# Altium footprint library Footprint-Lib-PhilsLab.PcbLib: 544 footprints (part 21 of 34)
Each footprint in its own frame and in the unit in brackets; x right, y up, seen from the top. Pads: shape width x height; smd on the part's side, far side on the other; paste and mask are expansions set on the pad; w line width, h text height; cw(c..) or ccw(c..) is an arc to the next point about the centre after c.
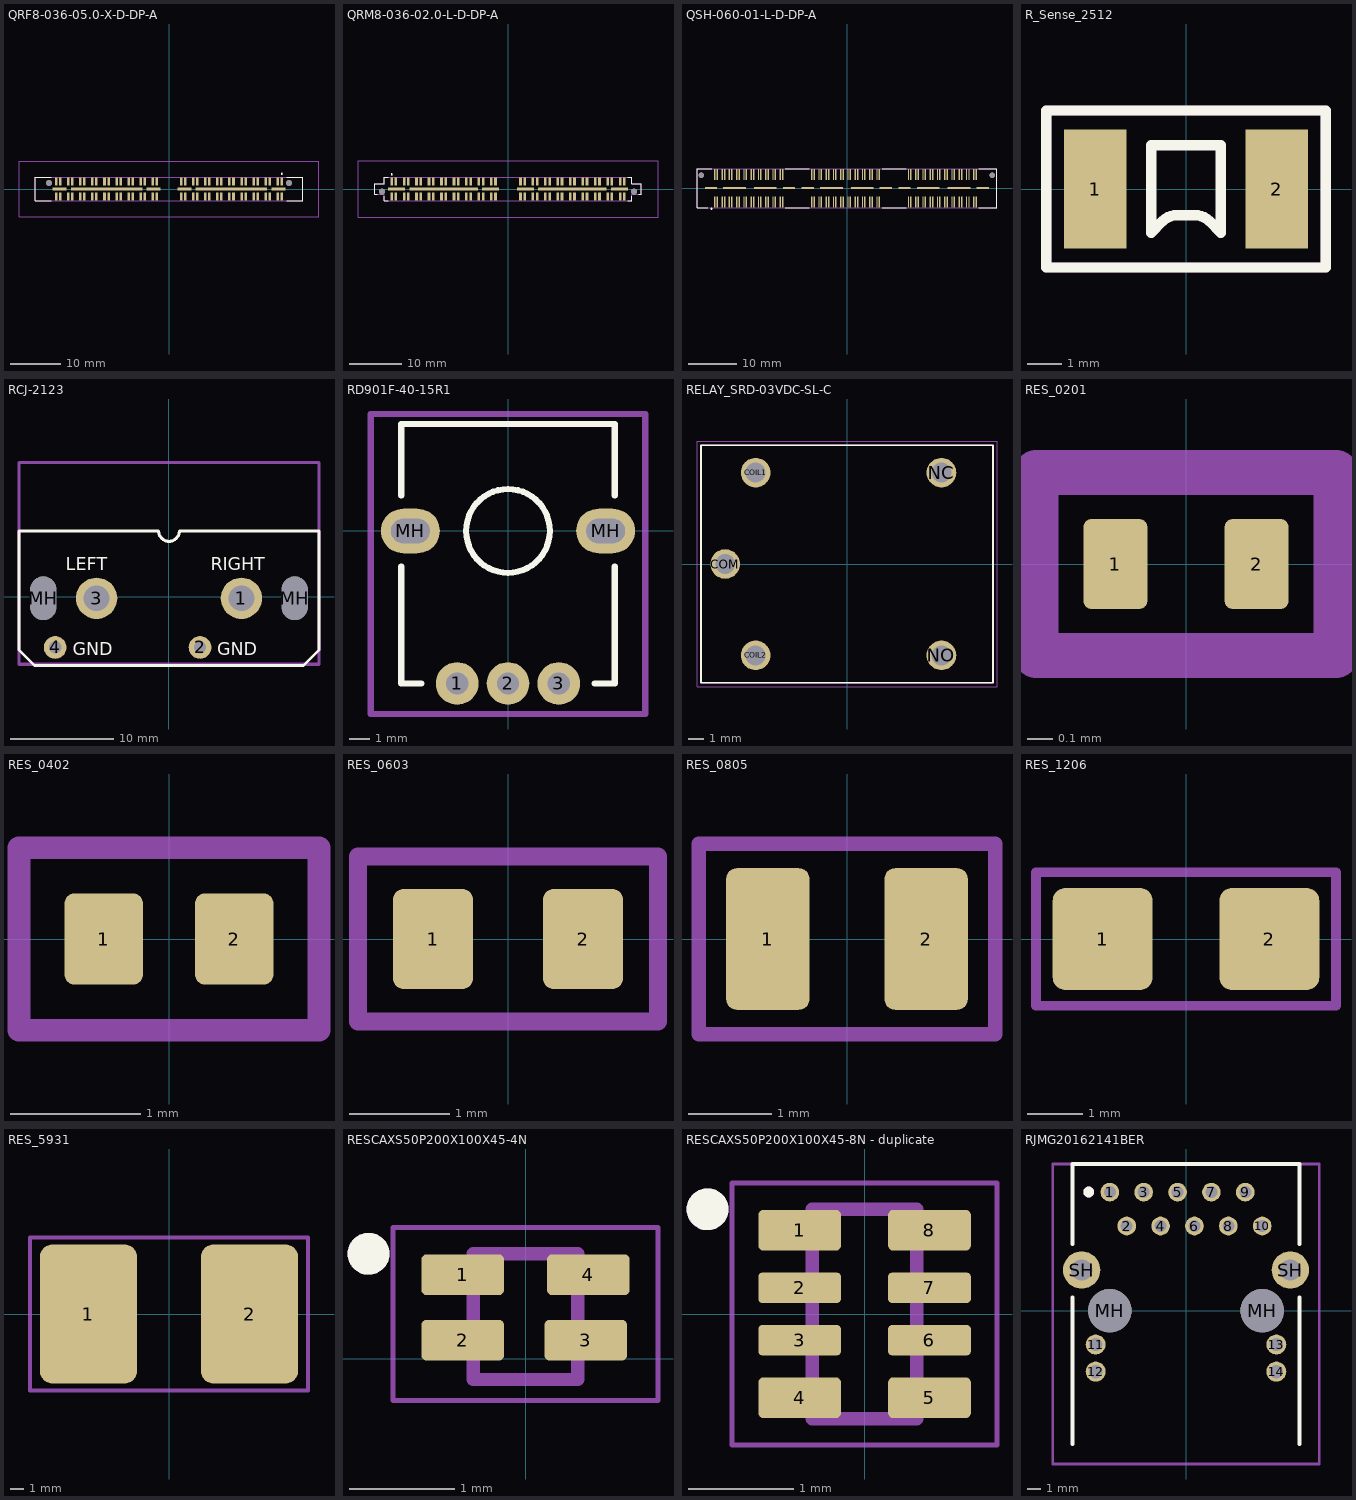
[diagram p20: the footprints below, top view; thin cyan lines are the x and y axes]

## QRF8-036-05.0-X-D-DP-A [mm]
pads (80):
  rect 0.5x1.65 smd: 1(22.4,1.475) 2(22.4,-1.475) 3(21.6,1.475) 4(21.6,-1.475) 5(20,1.475) 6(20,-1.475) 7(19.2,1.475) 8(19.2,-1.475) 9(17.6,1.475) 10(17.6,-1.475) 11(16.8,1.475) 12(16.8,-1.475) 13(15.2,1.475) 14(15.2,-1.475) 15(14.4,1.475) 16(14.4,-1.475) 17(12.8,1.475) 18(12.8,-1.475) 19(12,1.475) 20(12,-1.475) 21(10.4,1.475) 22(10.4,-1.475) 23(9.6,1.475) 24(9.6,-1.475) 25(8,1.475) 26(8,-1.475) 27(7.2,1.475) 28(7.2,-1.475) 29(5.6,1.475) 30(5.6,-1.475) 31(4.8,1.475) 32(4.8,-1.475) 33(3.2,1.475) 34(3.2,-1.475) 35(2.4,1.475) 36(2.4,-1.475) 37(-2.4,1.475) 38(-2.4,-1.475) 39(-3.2,1.475) 40(-3.2,-1.475) 41(-4.8,1.475) 42(-4.8,-1.475) 43(-5.6,1.475) 44(-5.6,-1.475) 45(-7.2,1.475) 46(-7.2,-1.475) 47(-8,1.475) 48(-8,-1.475) 49(-9.6,1.475) 50(-9.6,-1.475) 51(-10.4,1.475) 52(-10.4,-1.475) 53(-12,1.475) 54(-12,-1.475) 55(-12.8,1.475) 56(-12.8,-1.475) 57(-14.4,1.475) 58(-14.4,-1.475) 59(-15.2,1.475) 60(-15.2,-1.475) 61(-16.8,1.475) 62(-16.8,-1.475) 63(-17.6,1.475) 64(-17.6,-1.475) 65(-19.2,1.475) 66(-19.2,-1.475) 67(-20,1.475) 68(-20,-1.475) 69(-21.6,1.475) 70(-21.6,-1.475) 71(-22.4,1.475) 72(-22.4,-1.475)
  rect 2.76x0.56 smd: 73(-21.72,0) 73(-3.08,0) 73(3.08,0) 73(21.72,0)
  rect 14.19x0.56 smd: 73(-12.4,0) 73(12.4,0)
  round 1.13 hole 1.13 unplated: ""(-23.8,1.2) ""(23.8,1.2)
Top Overlay:
  circle w0.2: c22.4,3 r0.1
  lines w0.2: -23.4,-2.3 -26.585,-2.3 -26.585,2.3 -23.4,2.3 ; 23.4,-2.3 26.585,-2.3 26.585,2.3 23.4,2.3
Mechanical 13:
  circle w0.2: c22.4,3 r0.1
  lines w0.1: -26.585,-2.3 -26.585,2.3 26.585,2.3 26.585,-2.3 -26.585,-2.3
  text "'.Designator'" at -6.315,-1.4 h1
Mechanical 15:
  lines w0.05: -29.765,-5.48 29.765,-5.48 29.765,5.48 -29.765,5.48 -29.765,-5.48
3D body "QRF8-036-05_0-L-D-DP-A.stp": height 6.51, standoff -1.03, extent -26.585,-2.3 26.585,2.3

## QRM8-036-02.0-L-D-DP-A [mm]
pads (80):
  rect 0.5x1.5 smd: 1(-22.4,1.425) 2(-22.4,-1.425) 3(-21.6,1.425) 4(-21.6,-1.425) 5(-20,1.425) 6(-20,-1.425) 7(-19.2,1.425) 8(-19.2,-1.425) 9(-17.6,1.425) 10(-17.6,-1.425) 11(-16.8,1.425) 12(-16.8,-1.425) 13(-15.2,1.425) 14(-15.2,-1.425) 15(-14.4,1.425) 16(-14.4,-1.425) 17(-12.8,1.425) 18(-12.8,-1.425) 19(-12,1.425) 20(-12,-1.425) 21(-10.4,1.425) 22(-10.4,-1.425) 23(-9.6,1.425) 24(-9.6,-1.425) 25(-8,1.425) 26(-8,-1.425) 27(-7.2,1.425) 28(-7.2,-1.425) 29(-5.6,1.425) 30(-5.6,-1.425) 31(-4.8,1.425) 32(-4.8,-1.425) 33(-3.2,1.425) 34(-3.2,-1.425) 35(-2.4,1.425) 36(-2.4,-1.425) 37(2.4,1.425) 38(2.4,-1.425) 39(3.2,1.425) 40(3.2,-1.425) 41(4.8,1.425) 42(4.8,-1.425) 43(5.6,1.425) 44(5.6,-1.425) 45(7.2,1.425) 46(7.2,-1.425) 47(8,1.425) 48(8,-1.425) 49(9.6,1.425) 50(9.6,-1.425) 51(10.4,1.425) 52(10.4,-1.425) 53(12,1.425) 54(12,-1.425) 55(12.8,1.425) 56(12.8,-1.425) 57(14.4,1.425) 58(14.4,-1.425) 59(15.2,1.425) 60(15.2,-1.425) 61(16.8,1.425) 62(16.8,-1.425) 63(17.6,1.425) 64(17.6,-1.425) 65(19.2,1.425) 66(19.2,-1.425) 67(20,1.425) 68(20,-1.425) 69(21.6,1.425) 70(21.6,-1.425) 71(22.4,1.425) 72(22.4,-1.425)
  rect 3.28x0.51 smd: 73(-21.46,0) 73(-3.33,0) 73(3.33,0) 73(21.46,0)
  rect 13.15x0.51 smd: 73(-12.395,0) 73(12.395,0)
  round 1.13 hole 1.13 unplated: ""(-24.25,-0.5) ""(24.25,-0.5)
Top Overlay:
  circle w0.2: c-22.4,2.81 r0.1
  lines w0.2: -25.165,-1.05 -25.685,-1.05 -25.685,1.05 -23.825,1.05 -23.825,2.3 -23,2.3 ; -23.825,-1.415 -23.825,-2.3 -23,-2.3 ; 23,-2.3 23.825,-2.3 23.825,-1.415 ; 23,2.3 23.825,2.3 23.825,1.05 25.685,1.05 25.685,-1.05 25.165,-1.05
Mechanical 13:
  circle w0.2: c-22.4,2.81 r0.1
  lines w0.1: -25.685,-1.05 -25.685,1.05 -23.825,1.05 -23.825,2.3 23.825,2.3 23.825,1.05 25.685,1.05 25.685,-1.05 23.825,-1.05 23.825,-2.3 -23.825,-2.3 -23.825,-1.05 -25.685,-1.05
  text "'.Designator'" at -6.315,-1.4 h1
Mechanical 15:
  lines w0.05: -28.865,-5.48 -28.865,5.48 28.865,5.48 28.865,-5.48 -28.865,-5.48
3D body "QRM8-036-02_0-L-D-DP-A.stp": height 4.82, standoff -1.31, extent -25.685,-2.3 25.685,2.3

## QSH-060-01-L-D-DP-A [mm]
pads (134):
  rect 0.28x2.27 smd mask+0.13: 1(-27.3,-2.87) 2(-27.3,2.87) 3(-26.8,-2.87) 4(-26.8,2.87) 5(-25.8,-2.87) 6(-25.8,2.87) 7(-25.3,-2.87) 8(-25.3,2.87) 9(-24.3,-2.87) 10(-24.3,2.87) 11(-23.8,-2.87) 12(-23.8,2.87) 13(-22.8,-2.87) 14(-22.8,2.87) 15(-22.3,-2.87) 16(-22.3,2.87) 17(-21.3,-2.87) 18(-21.3,2.87) 19(-20.8,-2.87) 20(-20.8,2.87) 21(-19.8,-2.87) 22(-19.8,2.87) 23(-19.3,-2.87) 24(-19.3,2.87) 25(-18.3,-2.87) 26(-18.3,2.87) 27(-17.8,-2.87) 28(-17.8,2.87) 29(-16.8,-2.87) 30(-16.8,2.87) 31(-16.3,-2.87) 32(-16.3,2.87) 33(-15.3,-2.87) 34(-15.3,2.87) 35(-14.8,-2.87) 36(-14.8,2.87) 37(-13.8,-2.87) 38(-13.8,2.87) 39(-13.3,-2.87) 40(-13.3,2.87) 41(-7.3,-2.87) 42(-7.3,2.87) 43(-6.8,-2.87) 44(-6.8,2.87) 45(-5.8,-2.87) 46(-5.8,2.87) 47(-5.3,-2.87) 48(-5.3,2.87) 49(-4.3,-2.87) 50(-4.3,2.87) 51(-3.8,-2.87) 52(-3.8,2.87) 53(-2.8,-2.87) 54(-2.8,2.87) 55(-2.3,-2.87) 56(-2.3,2.87) 57(-1.3,-2.87) 58(-1.3,2.87) 59(-0.8,-2.87) 60(-0.8,2.87) 61(0.2,-2.87) 62(0.2,2.87) 63(0.7,-2.87) 64(0.7,2.87) 65(1.7,-2.87) 66(1.7,2.87) 67(2.2,-2.87) 68(2.2,2.87) 69(3.2,-2.87) 70(3.2,2.87) 71(3.7,-2.87) 72(3.7,2.87) 73(4.7,-2.87) 74(4.7,2.87) 75(5.2,-2.87) 76(5.2,2.87) 77(6.2,-2.87) 78(6.2,2.87) 79(6.7,-2.87) 80(6.7,2.87) 81(12.7,-2.87) 82(12.7,2.87) 83(13.2,-2.87) 84(13.2,2.87) 85(14.2,-2.87) 86(14.2,2.87) 87(14.7,-2.87) 88(14.7,2.87) 89(15.7,-2.87) 90(15.7,2.87) 91(16.2,-2.87) 92(16.2,2.87) 93(17.2,-2.87) 94(17.2,2.87) 95(17.7,-2.87) 96(17.7,2.87) 97(18.7,-2.87) 98(18.7,2.87) 99(19.2,-2.87) 100(19.2,2.87) 101(20.2,-2.87) 102(20.2,2.87) 103(20.7,-2.87) 104(20.7,2.87) 105(21.7,-2.87) 106(21.7,2.87) 107(22.2,-2.87) 108(22.2,2.87) 109(23.2,-2.87) 110(23.2,2.87) 111(23.7,-2.87) 112(23.7,2.87) 113(24.7,-2.87) 114(24.7,2.87) 115(25.2,-2.87) 116(25.2,2.87) 117(26.2,-2.87) 118(26.2,2.87) 119(26.7,-2.87) 120(26.7,2.87)
  rect 2.54x0.43 smd: EP(-28.12,0) EP(-11.99,0) EP(-8.11,0) EP(8.02,0) EP(11.9,0) EP(28.03,0)
  rect 4.7x0.43 smd: EP(-23.23,0) EP(-16.88,0) EP(-3.22,0) EP(3.13,0) EP(16.79,0) EP(23.14,0)
  round 1.05 hole 1.05 unplated: MH(-30.114,2.67) MH(30.01,2.67)
Top Overlay:
  circle w0.3: c-28,-4.25 r0.1
  lines w0.2: -28.75,-4 -31,-4 -31,4 -28,4 ; -12.75,-4 -7.8,-4 ; -12.75,4 -7.8,4 ; 7.25,-4 12.2,-4 ; 7.25,4 12.2,4 ; 27.25,-4 31,-4 31,4 27.25,4
Mechanical 13:
  lines w0.2: -31,-4 -31,4 31,4 31,-4 -31,-4
  text "'.Designator'" at -5.815,-0.9 h1
  text "1" at -28.657,-3.4 h1
  text "2" at -28.733,2.1 h1
3D body "QSH-060-01-L-D-DP-A.stp": height 3.26, standoff -0.74, extent -30.69,-3.747 30.69,3.747

## R_Sense_2512 [mm]
pads (2):
  rect 1.8x3.4 smd: 1(-2.6,0) 2(2.6,0)
Top Overlay:
  lines w0.3: -4,-2.25 -4,2.25 4,2.25 4,-2.25 -4,-2.25 ; -1,-1.25 -1,1.25 1,1.25 1,-1.25 0.677,-0.927 ccw(c0.25,-1.354) 0.25,-0.75 -0.25,-0.75 ccw(c-0.25,-1.354) -0.677,-0.927 -1,-1.25
Mechanical 13:
  lines w0.3: -4,-2.25 -4,2.25 4,2.25 4,-2.25 -3.75,-2.25 -4,-2.25
  text "'.Designator'" at -7.231,-1.087 h1.25
3D body "CSS2H-2512.step": height 0.84, standoff 0.01, extent -3.175,-1.525 3.175,1.525

## RCJ-2123 [mm]
pads (6):
  round 4 hole 2.5: 1(7,-0.125) 3(-7,-0.125)
  round 2.2 hole 1.2: 2(3,-4.875) 4(-11,-4.875)
  oval 2.5x4.2 hole 2.5 slot 4.2 at 90 deg unplated: MH(-12.15,-0.125) MH(12.15,-0.125)
Top Overlay:
  lines w0.3: -14.5,-5.125 -13,-6.625 13,-6.625 14.5,-5.125 14.5,6.375 1,6.375 cw(c0,6.375) 0,5.375 cw(c0,6.375) -1,6.375 -14.5,6.375 -14.5,-5.125
  text "RIGHT" at 4.038,2.6 h1.25
  text "LEFT" at -9.962,2.6 h1.25
  text "GND" at 4.684,-5.65 h1.25
  text "GND" at -9.316,-5.65 h1.25
Mechanical 13:
  lines w0.3: -14.5,-6.5 -14.5,-5.5 -14.5,13 14.5,13 14.5,-6.5 -14.5,-6.5
  text "'.Designator'" at -7.231,-1.087 h1.25
3D body "CUI_DEVICES_RCJ-2123.step": height 20.51, standoff -4.19, extent -13.69,-5.127 13.71,13.173

## RD901F-40-15R1 [mm]
pads (5):
  round 2.1 hole 1.1: 1(-2.5,-7.5) 2(0,-7.5) 3(2.5,-7.5)
  oval 2.9x2.2 hole 1.2 slot 1.9 at 0 deg: MH(-4.8,0) MH(4.8,0)
Top Overlay:
  circle w0.3: c0,0 r2.059
  lines w0.3: -5.25,-1.75 -5.25,-7.5 -4.25,-7.5 ; -5.25,1.75 -5.25,5.25 5.25,5.25 5.25,1.75 ; 4.25,-7.5 5.25,-7.5 5.25,-1.75
Mechanical 13:
  lines w0.3: -6.75,-9 -6.75,5.75 6.75,5.75 6.75,-9 -6.75,-9
  text ".Designator" at -4.998,-0.333 h1
3D body "RD901F-40-15R1.step": height 25.01, standoff -3.49, extent -5.854,-7.65 5.854,4.85

## RELAY_SRD-03VDC-SL-C [mm]
height 15.8
pads (5):
  round 1.95 hole 1.3: COIL1(-6,6) COIL2(-6,-6) COM(-8,0) NC(6.2,6) NO(6.2,-6)
Top Overlay:
  lines w0.127: -9.6,-7.8 -9.6,7.8 9.6,7.8 9.6,-7.8 -9.6,-7.8
Mechanical 13:
  lines w0.127: -9.6,-7.8 -9.6,7.8 9.6,7.8 9.6,-7.8 -9.6,-7.8
Mechanical 15:
  lines w0.05: -9.85,-8.05 -9.85,8.05 9.85,8.05 9.85,-8.05 -9.85,-8.05

## RES_0201 [mm]
pads (2):
  rrect25% 0.25x0.35 smd mask+0.05: 1(-0.275,0) 2(0.275,0)
Mechanical 13:
  lines w0.175: -0.584,-0.356 -0.584,0.356 0.584,0.356 0.584,-0.356 -0.584,-0.356
  text "'.Designator'" at -5.665,-0.417 h1
3D body "R0201.step": height 0.15, standoff 0, extent -0.3,-0.15 0.3,0.15

## RES_0402 [mm]
pads (2):
  rrect25% 0.6x0.7 smd: 1(-0.5,0) 2(0.5,0)
Mechanical 13:
  lines w0.175: -1.15,-0.7 1.15,-0.7 1.15,0.7 -1.15,0.7 -1.15,-0.7
  text "'.Designator'" at -5.665,-0.417 h1
3D body "R0402.step": height 0.3, standoff 0, extent -0.5,-0.25 0.5,0.25

## RES_0603 [mm]
pads (2):
  rrect25% 0.8x1 smd: 1(-0.75,0) 2(0.75,0)
Mechanical 13:
  lines w0.175: -1.5,-0.825 1.5,-0.825 1.5,0.825 -1.5,0.825 -1.5,-0.825
  text "'.Designator'" at -5.665,-0.417 h1
3D body "R0603.step": height 0.52, standoff 0.01, extent -0.8,-0.43 0.8,0.43

## RES_0805 [mm]
pads (2):
  rrect25% 1x1.7 smd: 1(-0.95,0) 2(0.95,0)
Mechanical 13:
  lines w0.175: -1.778,-1.143 -1.778,1.143 1.778,1.143 1.778,-1.143 -1.778,-1.143
  text "'.Designator'" at -5.665,-0.417 h1
3D body "R0805.step": height 0.47, standoff 0.01, extent -1,-0.63 1,0.63

## RES_1206 [mm]
pads (2):
  rrect25% 1.8x1.84 smd: 1(-1.5,0) 2(1.5,0)
Mechanical 13:
  lines w0.175: -2.7,-1.2 -2.7,1.2 2.7,1.2 2.7,-1.2 -2.7,-1.2
  text "'.Designator'" at -5.665,-0.417 h1
3D body "R1206.step": height 0.57, standoff 0.01, extent -1.6,-0.83 1.6,0.83

## RES_5931 [mm]
pads (2):
  rrect25% 7x10 smd: 1(-5.8,0) 2(5.8,0)
Mechanical 13:
  lines w0.3: -10,-5.5 -10,0.5 -10,5.5 10,5.5 10,-5.5 -10,-5.5
  text "'.Designator'" at -5.815,-0.9 h1
3D body "WSLP5931.stp": height 1.92, standoff 0, extent -7.5,-3.875 7.5,3.875

## RESCAXS50P200X100X45-4N [mm]
height 0.45
pads (4):
  rrect25% 0.79x0.39 smd: 1(-0.6,0.8) 2(-0.6,0.175) 3(0.575,0.175) 4(0.6,0.8)
Top Overlay:
  circle w0.2: c-1.5,1 r0.1
Mechanical 13:
  circle w0.2: c-1.5,1 r0.1
  lines w0.127: -0.5,-0.2 -0.5,1 0.5,1 0.5,-0.2 -0.5,-0.2
Mechanical 15:
  lines w0.05: -1.265,-0.4 1.265,-0.4 1.265,1.25 -1.265,1.25 -1.265,-0.4
3D body "EXB-24V5R1JX.STEP": height 0.45, standoff 0, extent -0.5,-0.025 0.5,0.975

## RESCAXS50P200X100X45-8N - duplicate [mm]
height 0.45
pads (8):
  rrect25% 0.79x0.39 smd: 1(-0.62,0.8) 4(-0.62,-0.8) 5(0.62,-0.8) 8(0.62,0.8)
  rrect25% 0.79x0.29 smd: 2(-0.62,0.25) 3(-0.62,-0.25) 6(0.62,-0.25) 7(0.62,0.25)
Top Overlay:
  circle w0.2: c-1.5,1 r0.1
Mechanical 13:
  circle w0.2: c-1.5,1 r0.1
  lines w0.127: -0.5,-1 -0.5,1 0.5,1 0.5,-1 -0.5,-1
Mechanical 15:
  lines w0.05: -1.265,-1.25 1.265,-1.25 1.265,1.25 -1.265,1.25 -1.265,-1.25
3D body "step_temp.STEP": height 0.45, standoff 0, extent -0.5,-1 0.5,1

## RJMG20162141BER [mm]
height 13.9
pads (18):
  round 1.4 hole 0.9: 1(-5.715,8.89) 2(-4.445,6.35) 3(-3.175,8.89) 4(-1.905,6.35) 5(-0.635,8.89) 6(0.635,6.35) 7(1.905,8.89) 8(3.175,6.35) 9(4.445,8.89) 10(5.715,6.35)
  round 1.5 hole 1: 11(-6.775,-2.54) 12(-6.775,-4.57) 13(6.775,-2.54) 14(6.775,-4.57)
  round 3.25 hole 3.25 unplated: MH(-5.715,0) MH(5.715,0)
  round 2.8 hole 1.6: SH(-7.825,3.05) SH(7.825,3.05)
Top Overlay:
  circle w0.4: c-7.3,8.9 r0.2
  lines w0.3: -8.5,-10 -8.5,1 ; -8.5,5 -8.5,11 8.5,11 8.5,5 ; 8.5,-10 8.5,1
Mechanical 13:
  circle w0.4: c-7.3,8.9 r0.2
  lines w0.2: -10,-11.5 -10,11 10,11 10,-11.5 -10,-11.5
  text "'.Designator'" at -5.665,-0.417 h1
3D body "RJMG20162141BER.STEP": height 14.87, standoff -3.31, extent -8.722,-11.075 8.721,10.57